# Altium footprint library MY_LIB_Shunts.PcbLib: 2 footprints
Each footprint in its own frame and in the unit in brackets; x right, y up, seen from the top. Pads: shape width x height; smd on the part's side, far side on the other; paste and mask are expansions set on the pad; w line width, h text height; cw(c..) or ccw(c..) is an arc to the next point about the centre after c.
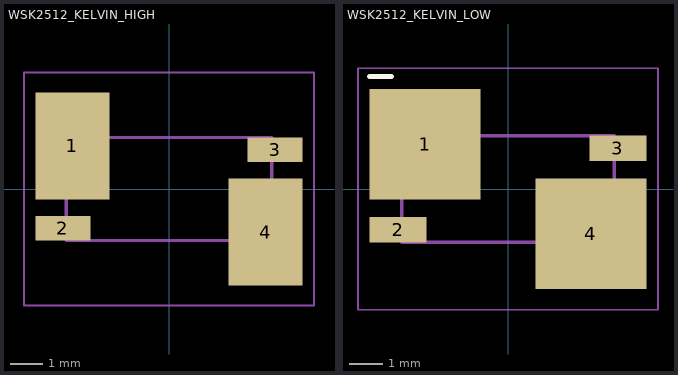
[diagram p0: the footprints below, top view; thin cyan lines are the x and y axes]

## WSK2512_KELVIN_HIGH [mm] "Vishay WSK2512 0.005 to 0.2 ohm, Kelvin, pads 1=I+, 2=S+, 3=S-, 4=I-"
height 0.635
pads (4):
  rect 2.29x3.3 smd paste+0 mask+0.05: 1(-2.985,1.331) 4(2.985,-1.331)
  rect 1.7x0.76 smd paste+0 mask+0.05: 2(-3.28,-1.209) 3(3.28,1.209)
Top Assembly:
  lines w0.1: -3.175,-1.59 3.175,-1.59 3.175,1.59 -3.175,1.59 -3.175,-1.59
Top Courtyard:
  lines w0.05: -4.48,-3.6 4.48,-3.6 4.48,3.6 -4.48,3.6 -4.48,-3.6
3D body "WSK2512 (0.005 to 0.2).stp": height 0.64, standoff 0, extent -3.175,-1.59 3.175,1.59

## WSK2512_KELVIN_LOW [mm] "Vishay WSK2512 0.001 to 0.0049 ohm, Kelvin, pads 1=I+, 2=S+, 3=S-, 4=I-"
height 0.635
pads (4):
  rect 3.3x3.3 smd paste+0 mask+0.05: 1(-2.475,1.331) 4(2.475,-1.331)
  rect 1.7x0.76 smd paste+0 mask+0.05: 2(-3.275,-1.209) 3(3.275,1.209)
Top Overlay:
  lines w0.15: -4.125,3.35 -3.475,3.35
Top Assembly:
  lines w0.1: -3.175,-1.59 3.175,-1.59 3.175,1.59 -3.175,1.59 -3.175,-1.59
Top Courtyard:
  lines w0.05: -4.475,-3.6 4.475,-3.6 4.475,3.6 -4.475,3.6 -4.475,-3.6
3D body "WSK2512 (0.001 to 0.0049).stp": height 0.64, standoff 0, extent -3.175,-1.59 3.175,1.59